# Altium schematic symbol library ADF4117BRUZ-RL7.SchLib: 1 symbol
Pins are listed as number, name and electrical type; pins without a type are passive.

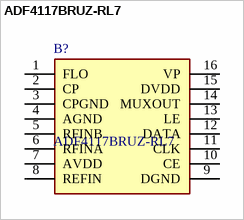
[diagram p0: symbol ADF4117BRUZ-RL7]

## ADF4117BRUZ-RL7
designator B?
Single, Integer-N 1.2 GHz PLL; Manufacturer_Name: Analog Devices; Geometry.Height: 1.2mm; Mouser Part Number: 584-ADF4117BRUZ-R7; Mouser Price/Stock: https://www.mouser.co.uk/ProductDetail/Analog-Devices/ADF4117BRUZ-RL7?qs=BpaRKvA4VqF9w8dTySOKZw%3D%3D; Manufacturer_Part_Number: ADF4117BRUZ-RL7; Datasheet Link: https://www.analog.com/ADF4117/datasheet
footprint SOP65P640X120-16N
pins: 1 FLO, 2 CP, 3 CPGND, 4 AGND, 5 RFINB, 6 RFINA, 7 AVDD, 8 REFIN, 9 DGND, 10 CE, 11 CLK, 12 DATA, 13 LE, 14 MUXOUT, 15 DVDD, 16 VP